# Altium footprint library PcbLib1.PcbLib: 9 footprints
Each footprint in its own frame and in the unit in brackets; x right, y up, seen from the top. Pads: shape width x height; smd on the part's side, far side on the other; paste and mask are expansions set on the pad; w line width, h text height; cw(c..) or ccw(c..) is an arc to the next point about the centre after c.
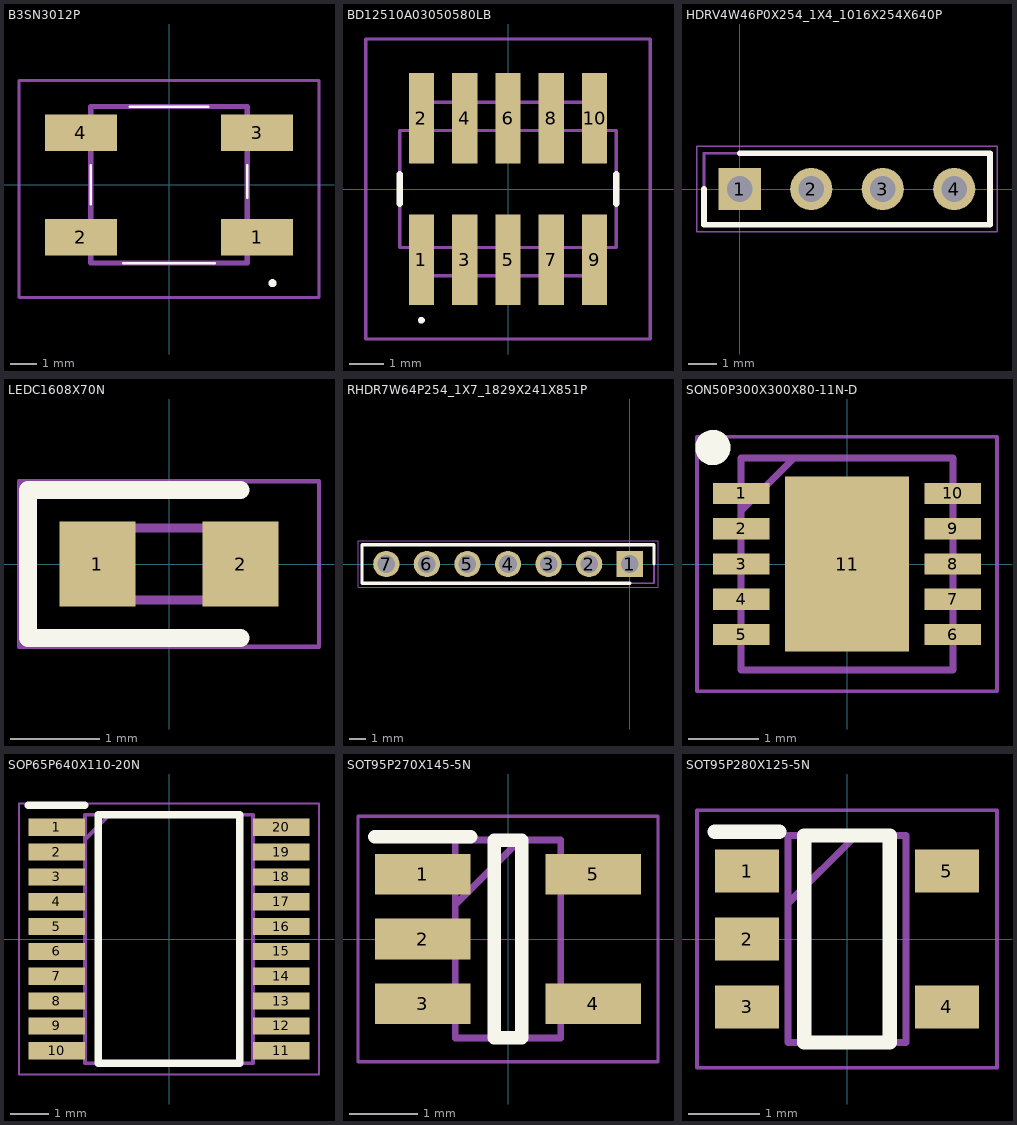
[diagram p0: the footprints below, top view; thin cyan lines are the x and y axes]

## B3SN3012P [mm]
pads (4):
  rect 2.75x1.4 smd: 1(3.375,-2) 2(-3.375,-2) 3(3.375,2) 4(-3.375,2)
Top Overlay:
  lines w0.1: -3,-0.75 -3,0.75 -3,-0.75 ; -1.75,-3 1.75,-3 -1.75,-3 ; -1.5,3 1.5,3 -1.5,3 ; 3,-0.5 3,0.75 3,-0.5
  lines w0.2: 3.969,-3.817 ccw(c3.969,-3.767) 3.969,-3.717 ; 3.969,-3.817 cw(c3.969,-3.767) 3.969,-3.717 ; 3.969,-3.817 ccw(c3.969,-3.767) 3.969,-3.717
Mechanical 13:
  lines w0.2: -3,-3 -3,3 3,3 3,-3 -3,-3
Mechanical 15:
  lines w0.1: -5.75,-4.318 -5.75,4 5.75,4 5.75,-4.318 -5.75,-4.318
3D body "B3SN-3012P.stp": height 3.1, standoff 0, extent -3.5,-3.22 3.5,3.28

## BD12510A03050580LB [mm]
pads (10):
  rect 0.74x2.65 smd: 1(-2.54,-2.075) 2(-2.54,2.075) 3(-1.27,-2.075) 4(-1.27,2.075) 5(0,-2.075) 6(0,2.075) 7(1.27,-2.075) 8(1.27,2.075) 9(2.54,-2.075) 10(2.54,2.075)
Top Overlay:
  lines w0.1: -2.54,-3.9 cw(c-2.54,-3.85) -2.54,-3.8 cw(c-2.54,-3.85) -2.54,-3.9
  lines w0.2: -3.175,-0.429 -3.175,0.429 ; 3.175,-0.429 3.175,0.429
Mechanical 13:
  lines w0.1: -2.54,-1.715 -2.54,-2.54 2.54,-2.54 2.54,-1.715 ; -2.54,1.715 -2.54,2.54 2.54,2.54 2.54,1.715 ; -3.175,-1.715 3.175,-1.715 3.175,1.715 -3.175,1.715 -3.175,-1.715
Mechanical 15:
  lines w0.1: -4.175,-4.4 4.175,-4.4 4.175,4.4 -4.175,4.4 -4.175,-4.4
3D body "BD125-10-A-0305-0580-L-B.stp": height 6.12, standoff 0, extent -3.17,-2.9 3.18,2.9

## HDRV4W46P0X254_1X4_1016X254X640P [mm]
pads (4):
  rect 1.5x1.5 hole 0.91: 1(0,0)
  round 1.5 hole 0.91: 2(2.54,0) 3(5.08,0) 4(7.62,0)
Top Overlay:
  lines w0.2: -1.27,0 -1.27,-1.27 8.89,-1.27 8.89,1.27 0,1.27
Mechanical 13:
  lines w0.1: -1.27,-1.27 8.89,-1.27 8.89,1.27 -1.27,1.27 -1.27,-1.27
Mechanical 15:
  lines w0.05: -1.52,-1.52 9.14,-1.52 9.14,1.52 -1.52,1.52 -1.52,-1.52
3D body "350-10-104-00-006000.stp": height 6.4, standoff -2.79, extent -1.27,-1.27 8.89,1.27

## LEDC1608X70N [mm]
pads (2):
  rect 0.85x0.95 smd: 1(-0.8,0) 2(0.8,0)
Top Overlay:
  lines w0.2: 0.8,-0.825 -1.575,-0.825 -1.575,0.825 0.8,0.825
Mechanical 13:
  lines w0.1: -0.8,0.133 -0.533,0.4 ; -0.8,-0.4 0.8,-0.4 0.8,0.4 -0.8,0.4 -0.8,-0.4
Mechanical 15:
  lines w0.05: -1.675,-0.925 1.675,-0.925 1.675,0.925 -1.675,0.925 -1.675,-0.925
3D body "HSMR-C191-S0000.stp": height 0.6, standoff 0, extent -0.8,-0.4 0.8,0.4

## RHDR7W64P254_1X7_1829X241X851P [mm]
pads (7):
  rect 1.65x1.65 hole 1.1: 1(0,0)
  round 1.65 hole 1.1: 2(-2.54,0) 3(-5.08,0) 4(-7.62,0) 5(-10.16,0) 6(-12.7,0) 7(-15.24,0)
Top Overlay:
  lines w0.2: 0,-1.205 -16.765,-1.205 -16.765,1.205 1.525,1.205 1.525,0
Mechanical 13:
  lines w0.1: -16.765,-1.205 -16.765,1.205 1.525,1.205 1.525,-1.205 -16.765,-1.205
Mechanical 15:
  lines w0.05: -17.015,-1.455 -17.015,1.455 1.775,1.455 1.775,-1.455 -17.015,-1.455
3D body "SSQ-107-01-T-S.stp": height 8.51, standoff -2.64, extent -16.765,-1.205 1.525,1.205

## SON50P300X300X80-11N-D [mm]
pads (11):
  rect 0.8x0.3 smd: 1(-1.5,1) 2(-1.5,0.5) 3(-1.5,0) 4(-1.5,-0.5) 5(-1.5,-1) 6(1.5,-1) 7(1.5,-0.5) 8(1.5,0) 9(1.5,0.5) 10(1.5,1)
  rect 1.75x2.48 smd: 11(0,0)
Top Overlay:
  circle w0.25: c-1.9,1.65 r0.125
Mechanical 13:
  lines w0.1: -1.5,0.75 -0.75,1.5 ; -1.5,-1.5 1.5,-1.5 1.5,1.5 -1.5,1.5 -1.5,-1.5
Mechanical 15:
  lines w0.05: -2.125,-1.8 2.125,-1.8 2.125,1.8 -2.125,1.8 -2.125,-1.8
3D body "LTC3127EDD#PBF.stp": height 0.8, standoff 0, extent -1.55,-1.5 1.55,1.5

## SOP65P640X110-20N [mm]
pads (20):
  rect 1.475x0.45 smd: 1(-2.938,2.925) 2(-2.938,2.275) 3(-2.938,1.625) 4(-2.938,0.975) 5(-2.938,0.325) 6(-2.938,-0.325) 7(-2.938,-0.975) 8(-2.938,-1.625) 9(-2.938,-2.275) 10(-2.938,-2.925) 11(2.938,-2.925) 12(2.938,-2.275) 13(2.938,-1.625) 14(2.938,-0.975) 15(2.938,-0.325) 16(2.938,0.325) 17(2.938,0.975) 18(2.938,1.625) 19(2.938,2.275) 20(2.938,2.925)
Top Overlay:
  lines w0.2: -3.675,3.5 -2.2,3.5 ; -1.85,-3.25 -1.85,3.25 1.85,3.25 1.85,-3.25 -1.85,-3.25
Mechanical 13:
  lines w0.1: -2.2,2.6 -1.55,3.25 ; -2.2,-3.25 -2.2,3.25 2.2,3.25 2.2,-3.25 -2.2,-3.25
Mechanical 15:
  lines w0.05: -3.925,-3.55 -3.925,3.55 3.925,3.55 3.925,-3.55 -3.925,-3.55
3D body "LPC804M101JDH20J.stp": height 1.1, standoff 0, extent -3.2,-3.25 3.2,3.25

## SOT95P270X145-5N [mm]
pads (5):
  rect 1.4x0.6 smd: 1(-1.25,0.95) 2(-1.25,0) 3(-1.25,-0.95) 4(1.25,-0.95) 5(1.25,0.95)
Top Overlay:
  lines w0.2: -1.95,1.5 -0.55,1.5 ; -0.2,-1.45 0.2,-1.45 0.2,1.45 -0.2,1.45 -0.2,-1.45
Mechanical 13:
  lines w0.1: -0.775,0.5 0.175,1.45 ; -0.775,-1.45 0.775,-1.45 0.775,1.45 -0.775,1.45 -0.775,-1.45
Mechanical 15:
  lines w0.05: -2.2,-1.8 2.2,-1.8 2.2,1.8 -2.2,1.8 -2.2,-1.8
3D body "MCP73831T-2ACI_OT.stp": height 1.45, standoff 0, extent -1.35,-1.45 1.35,1.45

## SOT95P280X125-5N [mm]
pads (5):
  rect 0.9x0.6 smd: 1(-1.4,0.95) 2(-1.4,0) 3(-1.4,-0.95) 4(1.4,-0.95) 5(1.4,0.95)
Top Overlay:
  lines w0.2: -1.85,1.5 -0.95,1.5 ; -0.6,-1.45 0.6,-1.45 0.6,1.45 -0.6,1.45 -0.6,-1.45
Mechanical 13:
  lines w0.1: -0.825,0.5 0.125,1.45 ; -0.825,-1.45 0.825,-1.45 0.825,1.45 -0.825,1.45 -0.825,-1.45
Mechanical 15:
  lines w0.05: -2.1,-1.8 2.1,-1.8 2.1,1.8 -2.1,1.8 -2.1,-1.8
3D body "BD5330G-2MTR.stp": height 1.25, standoff 0, extent -1.4,-1.45 1.4,1.45